# Altium schematic symbol library 7.8 - BW16.SCHLIB: 1 symbol
Pins are listed as number, name and electrical type; pins without a type are passive.

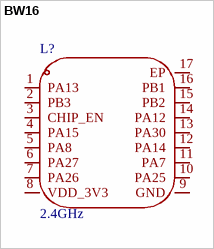
[diagram p0: symbol BW16]

## BW16
designator L?, comment 2.4GHz
Manufacturer: Ai-Thinker(安信可); Symbol: BW16; Add into BOM: yes; Core Processor: RTL8720DN芯片; Wireless Standard: 802.11a/b/g/n；BLE5.0; Support Interface: GPIO; Antenna Type: 板载PCB天线; Output Power: 16dBm; Operating Voltage: 3.3V; Sensitivity: -90dBm; Device: BW16; LCSC Part Name: BW16; Supplier Part: C2764067; Manufacturer Part: BW16; Supplier Footprint: SMD,16x24mm; JLCPCB Part Class: 扩展库; Datasheet: https://atta.szlcsc.com/upload/public/pdf/source/20210401/C2764067_693C1F68E98425ED6542274C1CB485A4.pdf; Supplier: LCSC; Convert to PCB: yes; Value: 2.4GHz; Receive  Current: -; Send  Current: -; Operating Temperature: -40℃~+85℃
footprint WIFI-SMD_BW16
3D model WIFI-SMD_BW16
pins: 1 PA13, 2 PB3, 3 CHIP_EN, 4 PA15, 5 PA8, 6 PA27, 7 PA26, 8 VDD_3V3, 9 GND, 10 PA25, 11 PA7, 12 PA14, 13 PA30, 14 PA12, 15 PB2, 16 PB1, 17 EP